# EAGLE library part IC_MB85RC256V (library dp_devices.v6)
MB85RC256V I2C 256K FRAM
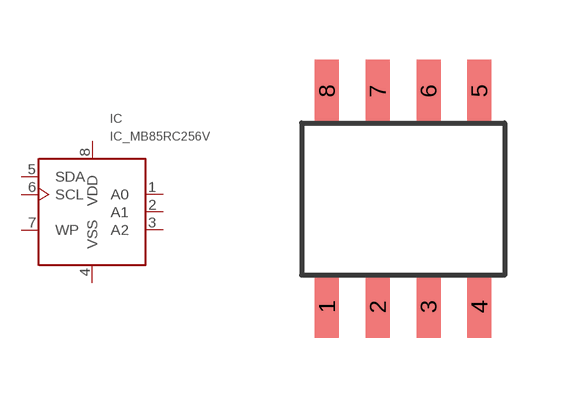
[diagram p191: symbol with the pads of SO-8; footprint SO-8]

Designator prefix IC

## IC_MB85RC256V  [SO-8]
1  A0  in
2  A1  in
3  A2  in
4  VSS  sup
5  SDA
6  SCL  in
7  WP  in
8  VDD  sup

## Footprint SO-8 (pad centres in mm)
smd 0.6 x 1.55: 1 -1.905,-2.69; 2 -0.635,-2.69; 3 0.635,-2.69; 4 1.905,-2.69; 5 1.905,2.71; 6 0.635,2.71; 7 -0.635,2.71; 8 -1.905,2.71